# Altium footprint library amirlib.PcbLib: 456 footprints (part 19 of 29)
Each footprint in its own frame and in the unit in brackets; x right, y up, seen from the top. Pads: shape width x height; smd on the part's side, far side on the other; paste and mask are expansions set on the pad; w line width, h text height; cw(c..) or ccw(c..) is an arc to the next point about the centre after c.
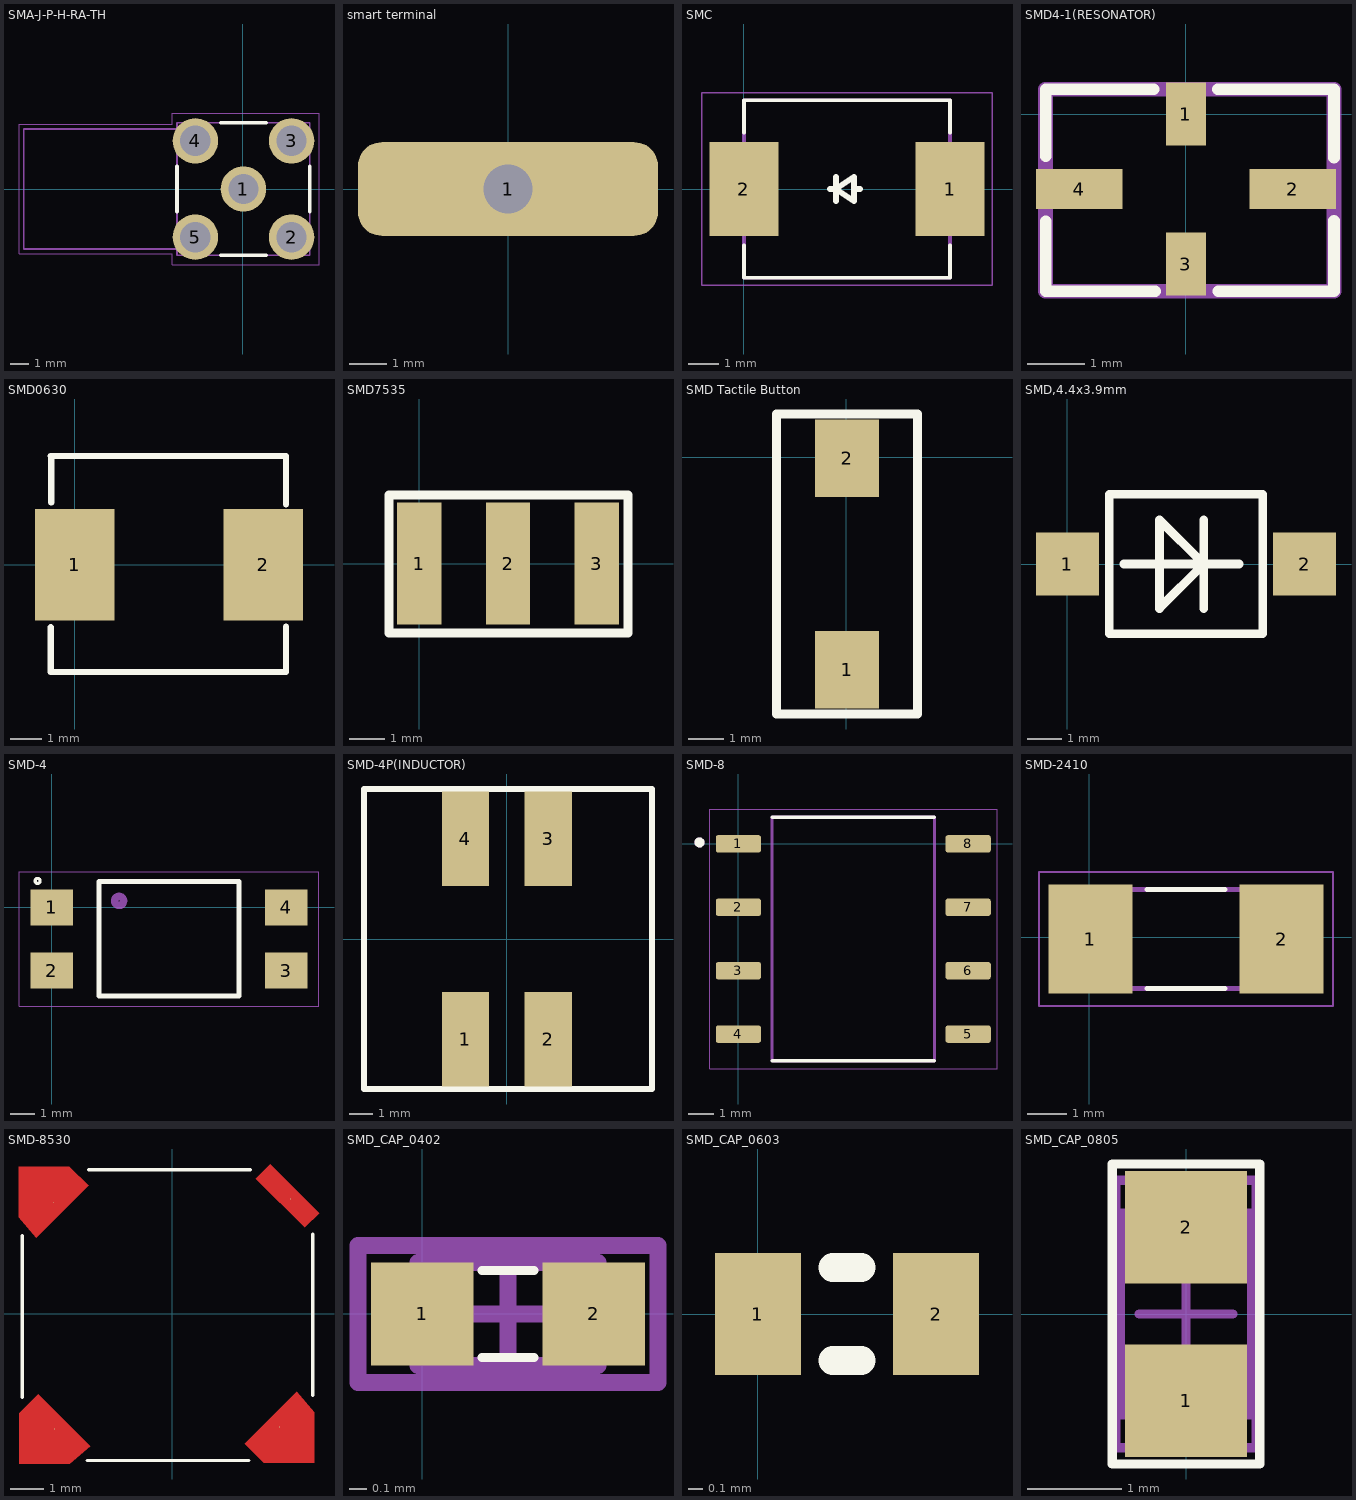
[diagram p18: the footprints below, top view; thin cyan lines are the x and y axes]

## SMA-J-P-H-RA-TH [mm]
pads (5):
  round 2.4 hole 1.6: 1(0.025,0.025) 2(2.565,-2.515) 3(2.565,2.565) 4(-2.515,2.565) 5(-2.515,-2.515)
Top Overlay:
  lines w0.2: -3.475,-1.175 -3.475,1.225 ; -1.175,-3.475 1.225,-3.475 ; -1.175,3.525 1.225,3.525 ; 3.525,-1.175 3.525,1.225
Mechanical 13:
  lines w0.1: -3.475,-3.14 -11.575,-3.14 -11.575,3.19 -3.475,3.19 ; -3.475,-3.14 -3.475,3.19 ; -3.475,-3.14 -3.475,-3.475 3.525,-3.475 3.525,3.525 -3.475,3.525 -3.475,3.19
Mechanical 15:
  lines w0.05: -11.825,-3.39 -3.725,-3.39 -3.725,-3.965 4.015,-3.965 4.015,4.015 -3.725,4.015 -3.725,3.44 -11.825,3.44 -11.825,-3.39
3D body "SMA-J-P-H-RA-TH1--3DModel-STEP-269445.STEP": height 9.86, standoff -3.94, extent -11.589,-3.531 3.511,3.469

## smart terminal [mm]
pads (1):
  rrect50% 8x2.5 hole 1.3 square: 1(0,0)

## SMC [mm]
pads (2):
  rect 2.29x3.12 smd: 1(6.86,0) 2(0,0)
Top Overlay:
  lines w0.127: 0.003,-1.88 0.003,-2.953 6.857,-2.953 6.857,-1.88 ; 0.003,1.88 0.003,2.953 6.857,2.953 6.857,1.88
  lines w0.2: 2.858,0 3.058,0 ; 3.058,-0.4 3.058,0.4 ; 3.658,0 3.858,0 ; 3.058,0 3.658,0.4 3.658,-0.4 3.058,0
Mechanical 13:
  lines w0.127: 0.003,-2.953 6.857,-2.953 6.857,2.953 0.003,2.953 0.003,-2.953
Mechanical 15:
  lines w0.05: -1.395,-3.203 8.255,-3.203 8.255,3.203 -1.395,3.203 -1.395,-3.203
3D body "SK86C.STEP": height 2.62, standoff 0, extent -0.413,-2.953 7.527,2.953

## SMD4-1(RESONATOR) [mm]
pads (4):
  rect 0.7x1.1 smd: 1(0,0) 3(0,-2.6)
  rect 1.5x0.7 smd: 2(1.85,-1.3) 4(-1.85,-1.3)
Top Overlay:
  lines w0.2: -2.435,-1.858 -2.435,-3.073 -0.533,-3.073 ; -2.435,-0.733 -2.435,0.427 ; -2.429,0.432 -0.559,0.432 ; 0.554,0.427 2.565,0.427 2.565,-0.762 ; 0.559,-3.073 2.565,-3.073 2.565,-1.854
Mechanical 13:
  lines w0.254: -2.435,-3.073 2.565,-3.073 2.565,0.427 -2.435,0.427 -2.435,-3.073

## SMD0630 [mm]
pads (2):
  rect 2.5x3.5 smd: 1(0,0) 2(5.944,0)
Top Overlay:
  lines w0.2: -0.745,-1.973 -0.745,-3.378 6.655,-3.378 6.655,-1.956 ; -0.745,3.422 6.655,3.422 6.655,1.905 ; -0.737,1.956 -0.737,3.413
3D body "User Library-L0603.STEP": height 3, standoff 0, extent -0.66,-3.247 6.74,3.353

## SMD7535 [mm]
pads (3):
  rect 1.27x3.5 smd: 1(0,0) 2(2.54,0) 3(5.08,0)
Top Overlay:
  lines w0.254: -0.864,-1.981 5.969,-1.981 5.969,1.956 -0.864,1.956 -0.864,-1.981

## SMD Tactile Button [mm]
pads (2):
  rect 1.8x2.2 smd: 1(0.025,-6.025) 2(0.025,-0.025)
Top Overlay:
  lines w0.254: -1.975,-7.275 -1.975,1.225 2.025,1.225 2.025,-7.275 -1.975,-7.275
3D body "TactileButton(6x3,5mm)_SMD.stp": height 2.45, standoff 0, extent -1.797,-6.947 1.803,0.851

## SMD,4.4x3.9mm [mm]
pads (2):
  rect 1.801x1.801 smd: 1(0,0) 2(6.802,0)
Top Overlay:
  lines w0.254: 1.623,0 4.925,0 ; 3.909,-1.27 3.909,1.27 ; 1.201,-1.999 5.601,-1.999 5.601,2.002 1.201,2.002 1.201,-1.999 ; 2.639,-1.27 2.639,1.27 3.909,0 2.639,-1.27
Mechanical 6:
  lines w0.051: 1.201,-1.948 5.601,-1.948 5.601,1.951 1.201,1.951 1.201,-1.948
3D body "LED_VBPW34S_VIS.step": height 1.3, standoff 0, extent 0.152,-2.121 6.858,2.273

## SMD-4 [mm]
pads (4):
  rect 1.7x1.45 smd: 1(0,0) 2(0,-2.54) 3(9.4,-2.54) 4(9.4,0)
Top Overlay:
  circle w0.127: c-0.573,1.06 r0.1
  lines w0.2: 1.9,1.02 1.9,-3.56 7.5,-3.56 7.5,1.02 ; 1.9,1.03 7.5,1.03
Mechanical 13:
  circle w0.3: c2.697,0.26 r0.18
Mechanical 15:
  lines w0.05: -1.32,-3.97 -1.32,1.43 10.72,1.43 10.72,-3.97 -1.32,-3.97
3D body "VO617A-9X017T.STEP": height 3.75, standoff 0.06, extent -0.38,-3.56 9.78,1.02

## SMD-4P(INDUCTOR) [mm]
pads (4):
  rect 2x4 smd: 1(-1.75,-4.25) 2(1.75,-4.25) 3(1.75,4.25) 4(-1.75,4.25)
Top Overlay:
  lines w0.254: -6.05,-6.35 6.15,-6.35 6.15,6.35 -6.05,6.35 -6.05,-6.35
3D body "Coilcraft-MSD1260.STEP": height 6.2, standoff 0, extent -6.05,-6.15 6.15,6.05

## SMD-8 [mm]
pads (8):
  rrect25% 1.81x0.69 smd: 1(0,0) 2(0,-2.54) 3(0,-5.08) 4(0,-7.62) 5(9.2,-7.62) 6(9.2,-5.08) 7(9.2,-2.54) 8(9.2,0)
Top Overlay:
  circle w0.2: c-1.556,0.055 r0.1
  lines w0.127: 1.35,-8.685 7.85,-8.685 ; 1.35,1.065 7.85,1.065
Mechanical 13:
  circle w0.2: c-1.556,0.055 r0.1
  lines w0.127: 1.35,-8.685 7.85,-8.685 7.85,1.065 1.35,1.065 1.35,-8.685
Mechanical 15:
  lines w0.05: -1.155,-9.01 10.355,-9.01 10.355,1.39 -1.155,1.39 -1.155,-9.01
3D body "step_temp.STEP": height 4.65, standoff 0, extent -0.425,-8.89 9.625,1.27

## SMD-2410 [mm]
pads (2):
  rect 2.15x2.8 smd: 1(0.025,-0.051) 2(4.935,-0.051)
Top Overlay:
  lines w0.127: 1.48,-1.321 3.48,-1.321 ; 1.48,1.219 3.48,1.219
Mechanical 13:
  lines w0.127: -0.57,-1.321 5.53,-1.321 5.53,1.219 -0.57,1.219 -0.57,-1.321
Mechanical 15:
  lines w0.05: -1.3,-1.771 -1.3,1.669 6.26,1.669 6.26,-1.771 -1.3,-1.771
3D body "step_temp.STEP": height 2.79, standoff 0, extent -0.57,-1.321 5.53,1.219

## SMD-8530 [mil]
pads (4):
  round 1 smd: 1(-138.5,130.5) 2(-137.5,-134.5) ""(125.5,-132.5) ""(138.5,134.5)
Top Layer:
  region: 171.85,117.85 155.15,101.15 98.13,158.16 114.84,174.87
  region: -158.73,88.99 -179.16,112.96 -179.16,172.01 -120.11,172.01 -97.84,149.74 -97.98,149.74
  region: -95.99,-154.73 -119.96,-175.16 -179.01,-175.16 -179.01,-116.11 -156.74,-93.84 -156.74,-93.98
  region: 145.73,-90.99 166.16,-114.96 166.16,-174.01 107.11,-174.01 84.84,-151.74 84.98,-151.74
Top Overlay:
  lines w3.94: -175.5,-97.48 -175.5,91.5 ; -99.48,-171.5 89.5,-171.5 ; -97.48,168.5 91.5,168.5 ; 164.5,-95.48 164.5,93.5
3D body "User Library-MLT-8530.STEP": height 118.11, standoff 0, extent -173,-168.8 161.64,165.85

## SMD_CAP_0402 [mm]
pads (2):
  rect 0.6x0.6 smd: 1(0,0) 2(1,0)
Top Overlay:
  lines w0.051: 0.348,-0.254 0.652,-0.254 ; 0.348,0.254 0.652,0.254
Mechanical 13:
  lines w0.1: -0.025,-0.3 -0.025,0.3 1.025,0.3 1.025,-0.3 -0.025,-0.3
Mechanical 15:
  lines w0.1: 0.2,0 0.8,0 ; 0.5,-0.3 0.5,0.3 ; -0.375,-0.4 -0.375,0.4 1.375,0.4 1.375,-0.4 -0.375,-0.4
3D body "C0402C152J5GACTU.STEP": height 0.5, standoff 0, extent 0.008,-0.279 1.008,0.271

## SMD_CAP_0603 [mm]
pads (2):
  rect 0.6x0.85 smd: 1(0,0) 2(1.244,0)
Top Overlay:
  lines w0.2: 0.522,-0.325 0.722,-0.325 ; 0.522,0.325 0.722,0.325
3D body "cap 0603.STEP": height 0.6, standoff 0, extent -0.14,-0.381 1.384,0.381

## SMD_CAP_0805 [mm]
pads (2):
  rect 1.3x1.2 smd: 1(0,-0.925) 2(0,0.925)
Top Overlay:
  lines w0.1: -0.787,-1.6 -0.787,1.6 0.787,1.6 0.787,-1.6 -0.787,-1.6
Mechanical 13:
  lines w0.1: -0.7,-1.075 -0.7,1.075 0.7,1.075 0.7,-1.075 -0.7,-1.075
Mechanical 15:
  lines w0.1: -0.5,0 0.5,0 ; 0,-0.5 0,0.5 ; -0.75,-1.425 -0.75,1.425 0.75,1.425 0.75,-1.425 -0.75,-1.425
3D body "cap 0805.STEP": height 0.65, standoff 0, extent -0.61,-0.991 0.66,1.041